# Altium footprint library Footprint-Lib-PhilsLab.PcbLib: 544 footprints (part 4 of 34)
Each footprint in its own frame and in the unit in brackets; x right, y up, seen from the top. Pads: shape width x height; smd on the part's side, far side on the other; paste and mask are expansions set on the pad; w line width, h text height; cw(c..) or ccw(c..) is an arc to the next point about the centre after c.
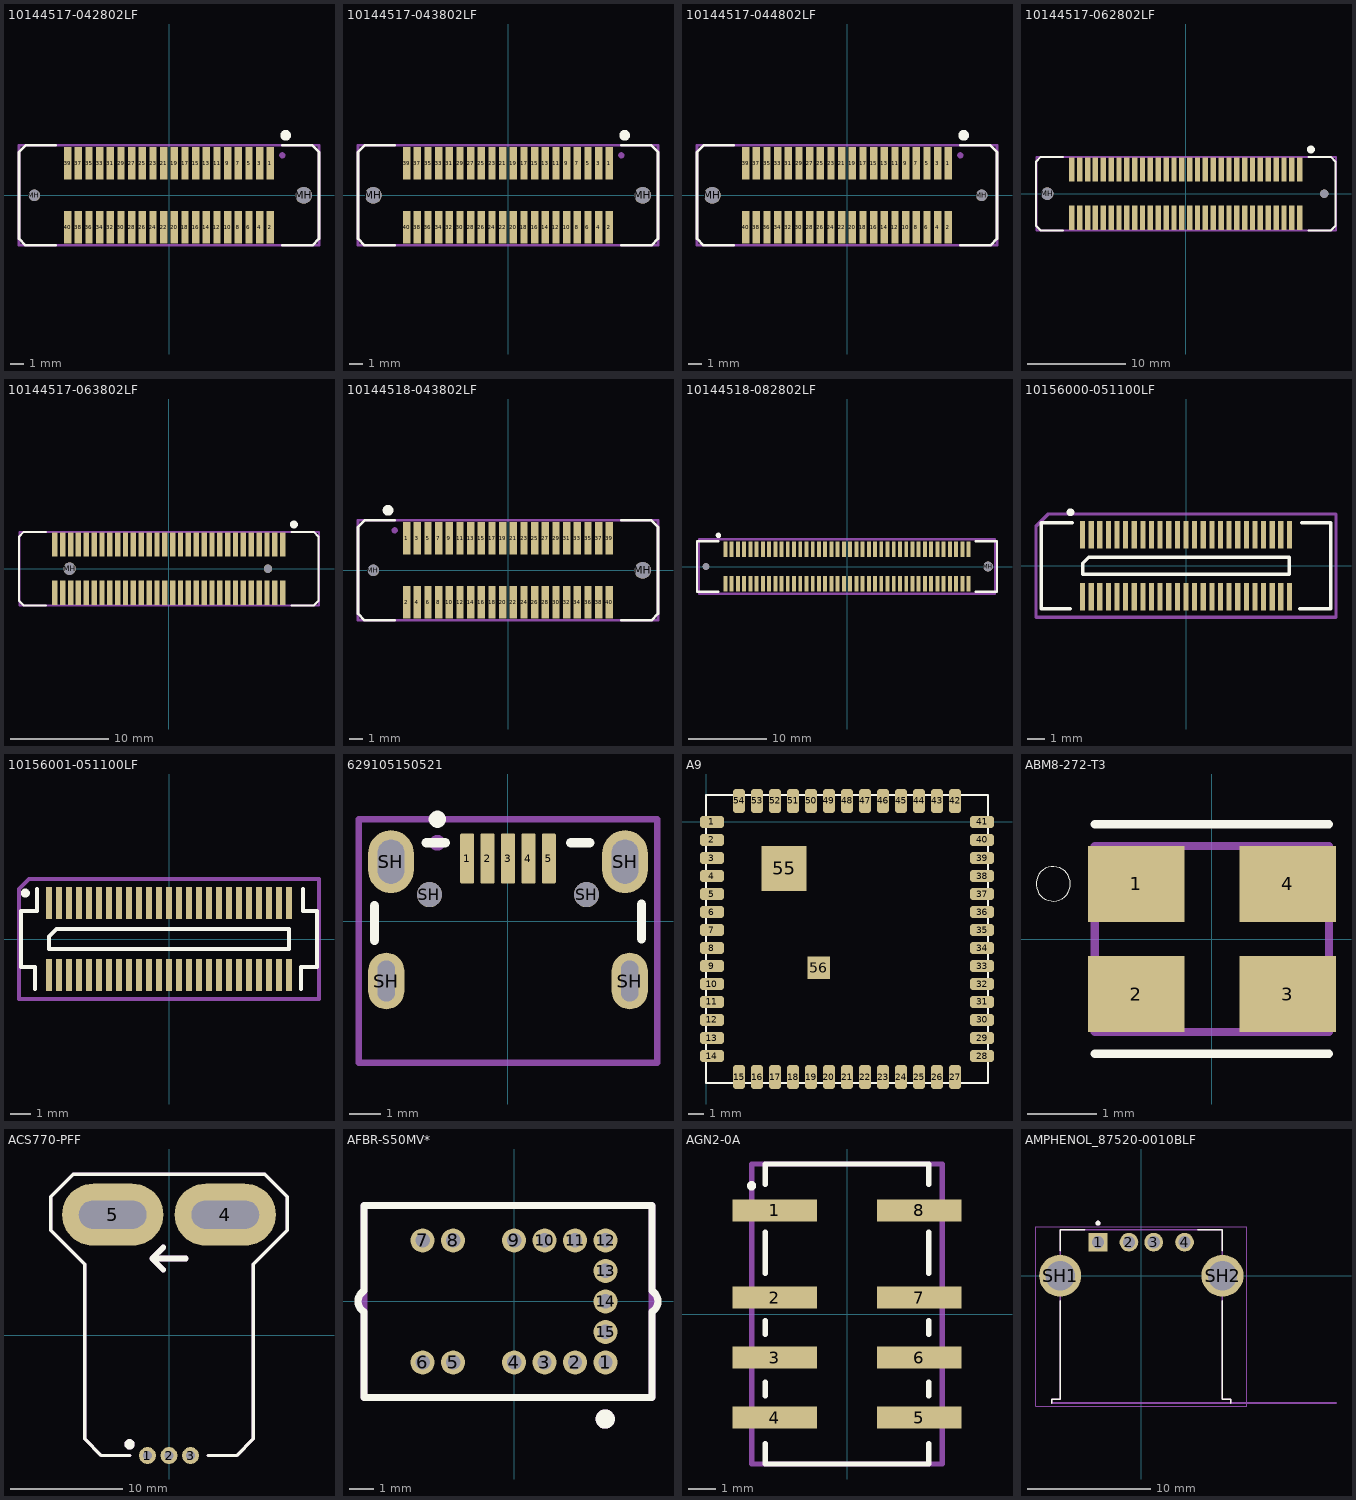
[diagram p3: the footprints below, top view; thin cyan lines are the x and y axes]

## 10144517-042802LF [mm]
pads (42):
  rect 0.55x2.45 smd: 1(7.6,2.4) 2(7.6,-2.4) 3(6.8,2.4) 4(6.8,-2.4) 5(6,2.4) 6(6,-2.4) 7(5.2,2.4) 8(5.2,-2.4) 9(4.4,2.4) 10(4.4,-2.4) 11(3.6,2.4) 12(3.6,-2.4) 13(2.8,2.4) 14(2.8,-2.4) 15(2,2.4) 16(2,-2.4) 17(1.2,2.4) 18(1.2,-2.4) 19(0.4,2.4) 20(0.4,-2.4) 21(-0.4,2.4) 22(-0.4,-2.4) 23(-1.2,2.4) 24(-1.2,-2.4) 25(-2,2.4) 26(-2,-2.4) 27(-2.8,2.4) 28(-2.8,-2.4) 29(-3.6,2.4) 30(-3.6,-2.4) 31(-4.4,2.4) 32(-4.4,-2.4) 33(-5.2,2.4) 34(-5.2,-2.4) 35(-6,2.4) 36(-6,-2.4) 37(-6.8,2.4) 38(-6.8,-2.4) 39(-7.6,2.4) 40(-7.6,-2.4)
  round 0.85 hole 0.85 unplated: MH(-10.1,0)
  round 1.25 hole 1.25 unplated: MH(10.1,0)
Top Overlay:
  circle w0.4: c8.75,4.5 r0.2
  lines w0.2: -8.5,-3.75 -10.75,-3.75 -11.25,-3.25 -11.25,3.25 -10.75,3.75 -8.5,3.75 ; 8.5,-3.75 10.75,-3.75 11.25,-3.25 11.25,3.25 10.75,3.75 8.5,3.75
Mechanical 13:
  circle w0.254: c8.5,3 r0.107
  lines w0.2: -11.25,0 -11.25,3.75 11.25,3.75 11.25,-3.75 -11.25,-3.75 -11.25,3.25
  text "'.Designator'" at -5.665,-0.417 h1
3D body "10144517-042x0xlf.stp": height 7.68, standoff -0.67, extent -10.9,-3.4 10.9,3.4

## 10144517-043802LF [mm]
pads (42):
  rect 0.55x2.45 smd: 1(7.6,2.4) 2(7.6,-2.4) 3(6.8,2.4) 4(6.8,-2.4) 5(6,2.4) 6(6,-2.4) 7(5.2,2.4) 8(5.2,-2.4) 9(4.4,2.4) 10(4.4,-2.4) 11(3.6,2.4) 12(3.6,-2.4) 13(2.8,2.4) 14(2.8,-2.4) 15(2,2.4) 16(2,-2.4) 17(1.2,2.4) 18(1.2,-2.4) 19(0.4,2.4) 20(0.4,-2.4) 21(-0.4,2.4) 22(-0.4,-2.4) 23(-1.2,2.4) 24(-1.2,-2.4) 25(-2,2.4) 26(-2,-2.4) 27(-2.8,2.4) 28(-2.8,-2.4) 29(-3.6,2.4) 30(-3.6,-2.4) 31(-4.4,2.4) 32(-4.4,-2.4) 33(-5.2,2.4) 34(-5.2,-2.4) 35(-6,2.4) 36(-6,-2.4) 37(-6.8,2.4) 38(-6.8,-2.4) 39(-7.6,2.4) 40(-7.6,-2.4)
  round 1.25 hole 1.25 unplated: MH(-10.1,0) MH(10.1,0)
Top Overlay:
  circle w0.4: c8.75,4.5 r0.2
  lines w0.2: -8.5,-3.75 -10.75,-3.75 -11.25,-3.25 -11.25,3.25 -10.75,3.75 -8.5,3.75 ; 8.5,-3.75 10.75,-3.75 11.25,-3.25 11.25,3.25 10.75,3.75 8.5,3.75
Mechanical 13:
  circle w0.254: c8.5,3 r0.107
  lines w0.2: -11.25,0 -11.25,3.75 11.25,3.75 11.25,-3.75 -11.25,-3.75 -11.25,3.25
  text "'.Designator'" at -5.665,-0.417 h1
3D body "10144517-043x0xxx.stp": height 11.71, standoff -0.44, extent -10.9,-3.4 10.9,3.4

## 10144517-044802LF [mm]
pads (42):
  rect 0.55x2.45 smd: 1(7.6,2.4) 2(7.6,-2.4) 3(6.8,2.4) 4(6.8,-2.4) 5(6,2.4) 6(6,-2.4) 7(5.2,2.4) 8(5.2,-2.4) 9(4.4,2.4) 10(4.4,-2.4) 11(3.6,2.4) 12(3.6,-2.4) 13(2.8,2.4) 14(2.8,-2.4) 15(2,2.4) 16(2,-2.4) 17(1.2,2.4) 18(1.2,-2.4) 19(0.4,2.4) 20(0.4,-2.4) 21(-0.4,2.4) 22(-0.4,-2.4) 23(-1.2,2.4) 24(-1.2,-2.4) 25(-2,2.4) 26(-2,-2.4) 27(-2.8,2.4) 28(-2.8,-2.4) 29(-3.6,2.4) 30(-3.6,-2.4) 31(-4.4,2.4) 32(-4.4,-2.4) 33(-5.2,2.4) 34(-5.2,-2.4) 35(-6,2.4) 36(-6,-2.4) 37(-6.8,2.4) 38(-6.8,-2.4) 39(-7.6,2.4) 40(-7.6,-2.4)
  round 1.25 hole 1.25 unplated: MH(-10.1,0)
  round 0.85 hole 0.85 unplated: MH(10.1,0)
Top Overlay:
  circle w0.4: c8.75,4.5 r0.2
  lines w0.2: -8.5,-3.75 -10.75,-3.75 -11.25,-3.25 -11.25,3.25 -10.75,3.75 -8.5,3.75 ; 8.5,-3.75 10.75,-3.75 11.25,-3.25 11.25,3.25 10.75,3.75 8.5,3.75
Mechanical 13:
  circle w0.254: c8.5,3 r0.107
  lines w0.2: -11.25,0 -11.25,3.75 11.25,3.75 11.25,-3.75 -11.25,-3.75 -11.25,3.25
  text "'.Designator'" at -5.665,-0.417 h1
3D body "10144517-044x0xxx.stp": height 15.71, standoff -0.69, extent -10.9,-3.4 10.9,3.4

## 10144517-062802LF [mm]
pads (62):
  rect 0.55x2.45 smd: 1(11.6,2.45) 2(11.6,-2.45) 3(10.8,2.45) 4(10.8,-2.45) 5(10,2.45) 6(10,-2.45) 7(9.2,2.45) 8(9.2,-2.45) 9(8.4,2.45) 10(8.4,-2.45) 11(7.6,2.45) 12(7.6,-2.45) 13(6.8,2.45) 14(6.8,-2.45) 15(6,2.45) 16(6,-2.45) 17(5.2,2.45) 18(5.2,-2.45) 19(4.4,2.45) 20(4.4,-2.45) 21(3.6,2.45) 22(3.6,-2.45) 23(2.8,2.45) 24(2.8,-2.45) 25(2,2.45) 26(2,-2.45) 27(1.2,2.45) 28(1.2,-2.45) 29(0.4,2.45) 30(0.4,-2.45) 31(-0.4,2.45) 32(-0.4,-2.45) 33(-1.2,2.45) 34(-1.2,-2.45) 35(-2,2.45) 36(-2,-2.45) 37(-2.8,2.45) 38(-2.8,-2.45) 39(-3.6,2.45) 40(-3.6,-2.45) 41(-4.4,2.45) 42(-4.4,-2.45) 43(-5.2,2.45) 44(-5.2,-2.45) 45(-6,2.45) 46(-6,-2.45) 47(-6.8,2.45) 48(-6.8,-2.45) 49(-7.6,2.45) 50(-7.6,-2.45) 51(-8.4,2.45) 52(-8.4,-2.45) 53(-9.2,2.45) 54(-9.2,-2.45) 55(-10,2.45) 56(-10,-2.45) 57(-10.8,2.45) 58(-10.8,-2.45) 59(-11.6,2.45) 60(-11.6,-2.45)
  round 1.25 hole 1.25 unplated: MH(-14.1,0)
  round 0.85 hole 0.85 unplated: MH(14.1,0)
Top Overlay:
  circle w0.4: c12.75,4.5 r0.2
  lines w0.2: -12.5,-3.75 -14.75,-3.75 -15.25,-3.25 -15.25,3.25 -14.75,3.75 -12.5,3.75 ; 12.5,-3.75 14.75,-3.75 15.25,-3.25 15.25,3.25 14.75,3.75 12.5,3.75
Mechanical 13:
  circle w0.254: c11.6,3.1 r0.107
  lines w0.2: -15.2,-3.75 -15.2,3.75 15.3,3.75 15.3,-3.75 -15.2,-3.75
  text "'.Designator'" at -5.665,-0.417 h1
3D body "10144517-062802LF.stp": height 7.71, standoff -0.69, extent -14.9,-3.4 14.9,3.4

## 10144517-063802LF [mm]
pads (62):
  rect 0.55x2.45 smd: 1(11.6,2.45) 2(11.6,-2.45) 3(10.8,2.45) 4(10.8,-2.45) 5(10,2.45) 6(10,-2.45) 7(9.2,2.45) 8(9.2,-2.45) 9(8.4,2.45) 10(8.4,-2.45) 11(7.6,2.45) 12(7.6,-2.45) 13(6.8,2.45) 14(6.8,-2.45) 15(6,2.45) 16(6,-2.45) 17(5.2,2.45) 18(5.2,-2.45) 19(4.4,2.45) 20(4.4,-2.45) 21(3.6,2.45) 22(3.6,-2.45) 23(2.8,2.45) 24(2.8,-2.45) 25(2,2.45) 26(2,-2.45) 27(1.2,2.45) 28(1.2,-2.45) 29(0.4,2.45) 30(0.4,-2.45) 31(-0.4,2.45) 32(-0.4,-2.45) 33(-1.2,2.45) 34(-1.2,-2.45) 35(-2,2.45) 36(-2,-2.45) 37(-2.8,2.45) 38(-2.8,-2.45) 39(-3.6,2.45) 40(-3.6,-2.45) 41(-4.4,2.45) 42(-4.4,-2.45) 43(-5.2,2.45) 44(-5.2,-2.45) 45(-6,2.45) 46(-6,-2.45) 47(-6.8,2.45) 48(-6.8,-2.45) 49(-7.6,2.45) 50(-7.6,-2.45) 51(-8.4,2.45) 52(-8.4,-2.45) 53(-9.2,2.45) 54(-9.2,-2.45) 55(-10,2.45) 56(-10,-2.45) 57(-10.8,2.45) 58(-10.8,-2.45) 59(-11.6,2.45) 60(-11.6,-2.45)
  round 1.25 hole 1.25 unplated: MH(-10.1,0)
  round 0.85 hole 0.85 unplated: MH(10.1,0)
Top Overlay:
  circle w0.4: c12.75,4.5 r0.2
  lines w0.2: -12.5,-3.75 -14.75,-3.75 -15.25,-3.25 -15.25,3.25 -14.75,3.75 -12.5,3.75 ; 12.5,-3.75 14.75,-3.75 15.25,-3.25 15.25,3.25 14.75,3.75 12.5,3.75
Mechanical 13:
  circle w0.254: c11.6,3.1 r0.107
  lines w0.2: -15.2,-3.75 -15.2,3.75 15.3,3.75 15.3,-3.75 -15.2,-3.75
  text "'.Designator'" at -5.665,-0.417 h1
3D body "10144517-063802LF.stp": height 11.65, standoff -0.75, extent -14.9,-3.4 14.9,3.4

## 10144518-043802LF [mm]
pads (42):
  rect 0.55x2.45 smd: 1(-7.6,2.4) 2(-7.6,-2.4) 3(-6.8,2.4) 4(-6.8,-2.4) 5(-6,2.4) 6(-6,-2.4) 7(-5.2,2.4) 8(-5.2,-2.4) 9(-4.4,2.4) 10(-4.4,-2.4) 11(-3.6,2.4) 12(-3.6,-2.4) 13(-2.8,2.4) 14(-2.8,-2.4) 15(-2,2.4) 16(-2,-2.4) 17(-1.2,2.4) 18(-1.2,-2.4) 19(-0.4,2.4) 20(-0.4,-2.4) 21(0.4,2.4) 22(0.4,-2.4) 23(1.2,2.4) 24(1.2,-2.4) 25(2,2.4) 26(2,-2.4) 27(2.8,2.4) 28(2.8,-2.4) 29(3.6,2.4) 30(3.6,-2.4) 31(4.4,2.4) 32(4.4,-2.4) 33(5.2,2.4) 34(5.2,-2.4) 35(6,2.4) 36(6,-2.4) 37(6.8,2.4) 38(6.8,-2.4) 39(7.6,2.4) 40(7.6,-2.4)
  round 0.85 hole 0.85 unplated: MH(-10.1,0)
  round 1.25 hole 1.25 unplated: MH(10.1,0)
Top Overlay:
  circle w0.4: c-9,4.5 r0.2
  lines w0.2: -8.5,-3.75 -10.75,-3.75 -11.25,-3.25 -11.25,3.25 -10.75,3.75 -8.5,3.75 ; 8.5,-3.75 10.75,-3.75 11.25,-3.25 11.25,3.25 10.75,3.75 8.5,3.75
Mechanical 13:
  circle w0.254: c-8.5,3 r0.107
  lines w0.2: -11.25,0 -11.25,3.75 11.25,3.75 11.25,-3.75 -11.25,-3.75 -11.25,3.25
  text "'.Designator'" at -5.665,-0.417 h1
3D body "10144518-043x0xxx.stp": height 6.71, standoff -0.64, extent -10.9,-3 10.9,3

## 10144518-082802LF [mm]
pads (82):
  rect 0.5x2 smd: 1(-15.6,2.2) 2(-15.6,-2.2) 3(-14.8,2.2) 4(-14.8,-2.2) 5(-14,2.2) 6(-14,-2.2) 7(-13.2,2.2) 8(-13.2,-2.2) 9(-12.4,2.2) 10(-12.4,-2.2) 11(-11.6,2.2) 12(-11.6,-2.2) 13(-10.8,2.2) 14(-10.8,-2.2) 15(-10,2.2) 16(-10,-2.2) 17(-9.2,2.2) 18(-9.2,-2.2) 19(-8.4,2.2) 20(-8.4,-2.2) 21(-7.6,2.2) 22(-7.6,-2.2) 23(-6.8,2.2) 24(-6.8,-2.2) 25(-6,2.2) 26(-6,-2.2) 27(-5.2,2.2) 28(-5.2,-2.2) 29(-4.4,2.2) 30(-4.4,-2.2) 31(-3.6,2.2) 32(-3.6,-2.2) 33(-2.8,2.2) 34(-2.8,-2.2) 35(-2,2.2) 36(-2,-2.2) 37(-1.2,2.2) 38(-1.2,-2.2) 39(-0.4,2.2) 40(-0.4,-2.2) 41(0.4,2.2) 42(0.4,-2.2) 43(1.2,2.2) 44(1.2,-2.2) 45(2,2.2) 46(2,-2.2) 47(2.8,2.2) 48(2.8,-2.2) 49(3.6,2.2) 50(3.6,-2.2) 51(4.4,2.2) 52(4.4,-2.2) 53(5.2,2.2) 54(5.2,-2.2) 55(6,2.2) 56(6,-2.2) 57(6.8,2.2) 58(6.8,-2.2) 59(7.6,2.2) 60(7.6,-2.2) 61(8.4,2.2) 62(8.4,-2.2) 63(9.2,2.2) 64(9.2,-2.2) 65(10,2.2) 66(10,-2.2) 67(10.8,2.2) 68(10.8,-2.2) 69(11.6,2.2) 70(11.6,-2.2) 71(12.4,2.2) 72(12.4,-2.2) 73(13.2,2.2) 74(13.2,-2.2) 75(14,2.2) 76(14,-2.2) 77(14.8,2.2) 78(14.8,-2.2) 79(15.6,2.2) 80(15.6,-2.2)
  round 0.85 hole 0.85 unplated: MH(-18.1,0)
  round 1.25 hole 1.25 unplated: MH(18.1,0)
Top Overlay:
  circle w0.4: c-16.5,4 r0.15
  lines w0.3: -16.5,-3.25 -19.25,-3.25 -19.25,3.25 -16.5,3.25 ; 16.5,-3.25 19.25,-3.25 19.25,3.25 16.5,3.25
Mechanical 13:
  lines w0.3: -19,-3.5 -19,3.5 19,3.5 19,-3.5 -19,-3.5
  text "'.Designator'" at -5.665,-0.417 h1
  text "1" at -17.167,2 h1
  text "2" at -17.333,-2.5 h1
3D body "10144518-082x0xxx.stp": height 5.71, standoff -0.64, extent -18.9,-3 18.9,3

## 10156000-051100LF [mm]
pads (50):
  rect 0.3x1.6 smd mask+0.05: 1(-6,1.8) 2(-5.5,1.8) 3(-5,1.8) 4(-4.5,1.8) 5(-4,1.8) 6(-3.5,1.8) 7(-3,1.8) 8(-2.5,1.8) 9(-2,1.8) 10(-1.5,1.8) 11(-1,1.8) 12(-0.5,1.8) 13(0,1.8) 14(0.5,1.8) 15(1,1.8) 16(1.5,1.8) 17(2,1.8) 18(2.5,1.8) 19(3,1.8) 20(3.5,1.8) 21(4,1.8) 22(4.5,1.8) 23(5,1.8) 24(5.5,1.8) 25(6,1.8) 26(6,-1.8) 27(5.5,-1.8) 28(5,-1.8) 29(4.5,-1.8) 30(4,-1.8) 31(3.5,-1.8) 32(3,-1.8) 33(2.5,-1.8) 34(2,-1.8) 35(1.5,-1.8) 36(1,-1.8) 37(0.5,-1.8) 38(0,-1.8) 39(-0.5,-1.8) 40(-1,-1.8) 41(-1.5,-1.8) 42(-2,-1.8) 43(-2.5,-1.8) 44(-3,-1.8) 45(-3.5,-1.8) 46(-4,-1.8) 47(-4.5,-1.8) 48(-5,-1.8) 49(-5.5,-1.8) 50(-6,-1.8)
Top Overlay:
  circle w0.25: c-6.7,3.1 r0.1
  lines w0.2: -6.7,-2.5 -8.4,-2.5 -8.4,2.5 -6.6,2.5 ; 6.6,-2.5 8.4,-2.5 8.4,2.5 6.7,2.5 ; -6,-0.5 6,-0.5 6,0.5 -5.635,0.5 -6,0.135 -6,-0.5
Mechanical 13:
  lines w0.2: -8.7,-3 -8.7,-0.4 -8.7,2.3 -8,3 8.7,3 8.7,-3 -8.7,-3
  text "'.Designator'" at -7.947,-1.41 h0.8
3D body "10156000-051100LF.stp": height 2.76, standoff 0.01, extent -8.15,-2.3 8.15,2.3

## 10156001-051100LF [mm]
pads (50):
  rect 0.3x1.6 smd mask+0.05: 1(-6,1.8) 2(-5.5,1.8) 3(-5,1.8) 4(-4.5,1.8) 5(-4,1.8) 6(-3.5,1.8) 7(-3,1.8) 8(-2.5,1.8) 9(-2,1.8) 10(-1.5,1.8) 11(-1,1.8) 12(-0.5,1.8) 13(0,1.8) 14(0.5,1.8) 15(1,1.8) 16(1.5,1.8) 17(2,1.8) 18(2.5,1.8) 19(3,1.8) 20(3.5,1.8) 21(4,1.8) 22(4.5,1.8) 23(5,1.8) 24(5.5,1.8) 25(6,1.8) 26(6,-1.8) 27(5.5,-1.8) 28(5,-1.8) 29(4.5,-1.8) 30(4,-1.8) 31(3.5,-1.8) 32(3,-1.8) 33(2.5,-1.8) 34(2,-1.8) 35(1.5,-1.8) 36(1,-1.8) 37(0.5,-1.8) 38(0,-1.8) 39(-0.5,-1.8) 40(-1,-1.8) 41(-1.5,-1.8) 42(-2,-1.8) 43(-2.5,-1.8) 44(-3,-1.8) 45(-3.5,-1.8) 46(-4,-1.8) 47(-4.5,-1.8) 48(-5,-1.8) 49(-5.5,-1.8) 50(-6,-1.8)
Top Overlay:
  circle w0.25: c-7.185,2.298 r0.1
  lines w0.2: -6.7,-2.5 -6.7,-1.4 -7.4,-1.4 -7.4,1.4 -6.6,1.4 -6.6,2.5 ; 6.6,-2.5 6.6,-1.4 7.4,-1.4 7.4,1.4 6.7,1.4 6.7,2.5 ; -6,-0.5 -6,0.135 -5.635,0.5 6,0.5 6,-0.5 -6,-0.5
Mechanical 13:
  lines w0.2: -7.5,-3 7.5,-3 7.5,3 -7,3 -7.5,2.5 -7.5,-1 -7.5,-3
  text "'.Designator'" at -7.947,-1.41 h0.8
3D body "10156001-051100LF.stp": height 2.8, standoff 0.01, extent -7.175,-2.3 7.175,2.3

## 629105150521 [mm]
height 2.35
pads (11):
  rrect25% 0.45x1.6 smd mask+0.12: 1(-1.3,2) 2(-0.65,2) 3(0,2) 4(0.65,2) 5(1.3,2)
  oval 1.15x1.8 hole 0.55 slot 1.3 at 90 deg: SH(-3.875,-1.9) SH(3.875,-1.9)
  oval 1.45x2 hole 0.85 slot 1.4 at 90 deg mask+0.15: SH(-3.725,1.9) SH(3.725,1.9)
  round 0.8 hole 0.8 unplated mask+0.3: SH(-2.5,0.85) SH(2.5,0.85)
Top Overlay:
  circle w0.3: c-2.25,3.25 r0.125
  lines w0.3: -4.25,-0.6 -4.25,0.5 ; -2.6,2.5 -2,2.5 ; 2,2.5 2.6,2.5 ; 4.25,-0.55 4.25,0.55
Mechanical 13:
  circle w0.3: c-2.25,2.5 r0.1
  lines w0.2: -4.75,-4.5 -4.75,3.25 4.75,3.25 4.75,-4.5 -4.75,-4.5
  text ".Designator" at -4.998,-0.333 h1
3D body "629105150521.stp": height 2.78, standoff -1.75, extent -4,-4.3 4,2.303

## A9 [mm]
pads (56):
  rrect50% 1.6x0.8 smd: 1(0.4,0) 2(0.4,-1.2) 3(0.4,-2.4) 4(0.4,-3.6) 5(0.4,-4.8) 6(0.4,-6) 7(0.4,-7.2) 8(0.4,-8.4) 9(0.4,-9.6) 10(0.4,-10.8) 11(0.4,-12) 12(0.4,-13.2) 13(0.4,-14.4) 14(0.4,-15.6) 28(18.4,-15.6) 29(18.4,-14.4) 30(18.4,-13.2) 31(18.4,-12) 32(18.4,-10.8) 33(18.4,-9.6) 34(18.4,-8.4) 35(18.4,-7.2) 36(18.4,-6) 37(18.4,-4.8) 38(18.4,-3.6) 39(18.4,-2.4) 40(18.4,-1.2) 41(18.4,0)
  rrect50% 0.8x1.6 smd: 15(2.2,-17) 16(3.4,-17) 17(4.6,-17) 18(5.8,-17) 19(7,-17) 20(8.2,-17) 21(9.4,-17) 22(10.6,-17) 23(11.8,-17) 24(13,-17) 25(14.2,-17) 26(15.4,-17) 27(16.6,-17) 42(16.6,1.4) 43(15.4,1.4) 44(14.2,1.4) 45(13,1.4) 46(11.8,1.4) 47(10.6,1.4) 48(9.4,1.4) 49(8.2,1.4) 50(7,1.4) 51(5.8,1.4) 52(4.6,1.4) 53(3.4,1.4) 54(2.2,1.4)
  rect 3x3 smd: 55(5.2,-3.1)
  rect 1.5x1.5 smd: 56(7.5,-9.7)
Top Overlay:
  lines w0.127: 0,-17.4 0,1.8 18.8,1.8 18.8,-17.4 0,-17.4

## ABM8-272-T3 [mm]
pads (4):
  rect 1.4x1.1 smd: 1(-1.1,0.8) 2(-1.1,-0.8) 3(1.1,-0.8) 4(1.1,0.8)
Top Overlay:
  circle w0: c-2.304,0.8 r0.25
  lines w0.12: -1.7,-1.664 1.7,-1.664 ; -1.7,1.664 1.7,1.664
Mechanical 13:
  lines w0.12: -1.7,-1.35 -1.7,1.35 1.7,1.35 1.7,-1.35 -1.7,-1.35
3D body "ABM8-272-T3.STEP": height 0.7, standoff 0, extent -1.6,-1.25 1.6,1.25

## ACS770-PFF [mm]
pads (5):
  round 1.5 hole 0.8: 1(-1.91,-10.7) 2(0,-10.7) 3(1.91,-10.7)
  oval 9x5.5 hole 2.5 slot 6 at 0 deg: 4(5,10.7) 5(-5,10.7)
Top Overlay:
  circle w0.5: c-3.5,-9.7 r0.203
  lines w0.3: -3.5,-10.7 -6,-10.7 -7.5,-9.2 -7.5,0.8 -7.5,6.3 -10.5,9.3 -10.5,12.3 -8.5,14.3 0,14.3 8.5,14.3 10.5,12.3 10.5,9.3 8.5,7.3 7.5,6.3 7.5,-9.2 6,-10.7 3.5,-10.7
  lines w0.5: -0.5,5.8 -1.5,6.8 ; -0.5,7.8 -1.5,6.8 ; 1.5,6.8 -1.5,6.8
Mechanical 13:
  circle w0.5: c-3.5,-9.7 r0.203
  lines w0.3: -3.5,-10.7 -6,-10.7 -7.5,-9.2 -7.5,0.8 -7.5,6.3 -10.5,9.3 -10.5,12.3 -8.5,14.3 0,14.3 8.5,14.3 10.5,12.3 10.5,9.3 8.5,7.3 7.5,6.3 7.5,-9.2 6,-10.7 3.5,-10.7
  lines w0.5: -0.5,5.8 -1.5,6.8 ; -0.5,7.8 -1.5,6.8 ; 1.5,6.8 -1.5,6.8
  text "'.Designator'" at -6.315,-1.4 h1
3D body "ACS770-PFF.STEP": height 7.01, standoff -3.52, extent -7.002,-11.214 6.998,11.603

## AFBR-S50MV* [mm]
pads (15):
  round 1 hole 0.6: 1(3.81,-2.54) 2(2.54,-2.54) 3(1.27,-2.54) 4(0,-2.54) 5(-2.54,-2.54) 6(-3.81,-2.54) 7(-3.81,2.54) 8(-2.54,2.54) 9(0,2.54) 10(1.27,2.54) 11(2.54,2.54) 12(3.81,2.54) 13(3.81,1.27) 14(3.81,0) 15(3.81,-1.27)
Top Overlay:
  circle w0.5: c3.8,-4.9 r0.15
  lines w0.3: -6.254,-0.43 cw(c-6,0) -6.251,0.432 ; -6.25,-0.5 -6.25,-4 5.75,-4 5.75,-0.435 ccw(c5.747,-0.435) 5.747,-0.432 ccw(c5.496,0) 5.75,0.43 5.75,4 -6.25,4 -6.25,0.5
Mechanical 13:
  circle w0.5: c3.8,-4.9 r0.15
  lines w0.3: -6.25,-4 -6.25,4 5.75,4 5.75,-4 -6.25,-4
  text "'.Designator'" at -5.665,-0.417 h1
3D body "AFBR-S50MV85G.stp": height 7.71, standoff -4.29, extent -6.42,-3.8 5.98,3.8

## AGN2-0A [mm]
pads (8):
  rect 3.1x0.8 smd: 1(-2.65,3.8) 2(-2.65,0.6) 3(-2.65,-1.6) 4(-2.65,-3.8) 5(2.65,-3.8) 6(2.65,-1.6) 7(2.65,0.6) 8(2.65,3.8)
Top Overlay:
  circle w0.3: c-3.5,4.7 r0.021
  lines w0.2: -3,-4.75 -3,-5.5 3,-5.5 3,-4.75 ; -3,-3 -3,-2.5 ; -3,-0.75 -3,-0.25 ; -3,1.5 -3,3 ; -3,4.75 -3,5.5 3,5.5 3,4.75 ; 3,-3 3,-2.5 ; 3,-0.75 3,-0.25 ; 3,1.5 3,3
Mechanical 13:
  circle w0.3: c-2.2,3.8 r0.108
  lines w0.2: -3.5,-5.5 -3.5,5.5 3.5,5.5 3.5,-5.5 -3.5,-5.5
  text ".Designator" at -4.998,-0.333 h1
3D body "agn210a12.step": height 10.04, standoff 0.04, extent -3.7,-5.3 3.7,5.3

## AMPHENOL_87520-0010BLF [mm]
height 7.7
pads (6):
  rect 1.508x1.508 / inner round 1.508 / far side rect 1.508x1.508 hole 1 mask+0.05: 1(-3.5,2.71)
  round 1.508 hole 1 mask+0.05: 2(-1,2.71) 3(1,2.71) 4(3.5,2.71)
  round 3.396 hole 2.38 mask+0.05: SH1(-6.57,0) SH2(6.57,0)
Top Overlay:
  circle w0.2: c-3.5,4.25 r0.1
  lines w0.127: -7.25,-10.3 -7.25,-10 -6.55,-10 -6.55,-2.018 ; -6.55,2.018 -6.55,3.7 -4.574,3.7 ; 4.574,3.7 6.55,3.7 6.55,2.018 ; 6.55,-2.018 6.55,-10 7.25,-10 7.25,-10.3
Mechanical 13:
  circle w0.2: c-3.5,4.25 r0.1
  lines w0.127: 15.75,-10.3 7.25,-10.3 ; 7.25,-10.3 7.25,-10 6.55,-10 6.55,3.7 -6.55,3.7 -6.55,-10 -7.25,-10 -7.25,-10.3 7.25,-10.3
  text "PCB EDGE" at 8.6,-10.2 h1
Mechanical 15:
  lines w0.05: -8.518,-10.55 8.518,-10.55 8.518,3.95 -8.518,3.95 -8.518,-10.55
3D body "step_temp.STEP": height 7.74, standoff -2.74, extent -7.2,-10 7.3,4